# Altium schematic symbol library 2019-10-13_10-42-52.SchLib: 2 symbols
Pins are listed as number, name and electrical type; pins without a type are passive.

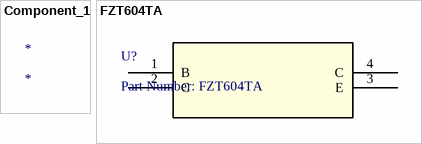
[diagram p0: symbols Component_1 to FZT604TA]

## Component_1
designator *

## FZT604TA
designator U?, comment Part Number: FZT604TA
No Description Available; Vendor: Diodes Inc; Built_By: EMA_UL_Team; Manufacturer_Part_Number: FZT604TA; Copyright: Copyright (C) 2018 Accelerated Designs. All rights reserved; RefDes: RefDes; Type: DEV; Value: Value
footprint SOT-223
pins: 1 B, 2 C, 3 E, 4 C